# Altium footprint library GRM155Z71A225KE01D.PcbLib: 3 footprints
Each footprint in its own frame and in the unit in brackets; x right, y up, seen from the top. Pads: shape width x height; smd on the part's side, far side on the other; paste and mask are expansions set on the pad; w line width, h text height; cw(c..) or ccw(c..) is an arc to the next point about the centre after c.
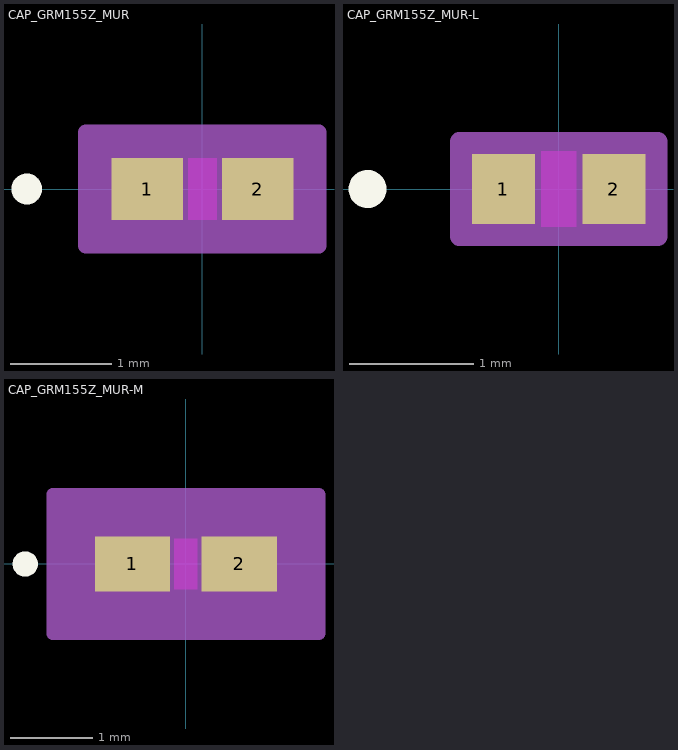
[diagram p0: the footprints below, top view; thin cyan lines are the x and y axes]

## CAP_GRM155Z_MUR [mil]
pads (2):
  rect 27.78x24 smd paste+0 mask+0: 1(-21.39,0) 2(21.39,0)
Top Layer keep-out:
  region: -5.5,-10 -5.5,10 5.5,10 5.5,-10
Top Overlay:
  circle w6: c-68.28,0 r3
  text ".Designator" at -137.5,-25 h50
Keep-Out Layer:
  region: -5.5,-12 -5.5,12 5.5,12 5.5,-12
Mechanical 13:
  circle w1: c-16.39,0 r3
  lines w1: -21.5,-12 -21.5,12 ; -21.5,-12 -7.5,-12 -7.5,12 -21.5,12 ; -21.5,-12 21.5,-12 ; -21.5,-12 -21.5,12 ; -21.5,12 21.5,12 ; 21.5,-12 7.5,-12 7.5,12 21.5,12 ; 21.5,-12 21.5,12 ; 21.5,-12 21.5,12
  text ".Designator" at -137.5,-25 h50
Mechanical 15:
  region: 45.28,-22 -45.28,-22 -45.28,22 45.28,22
  lines w6: -45.28,-22 -45.28,22 45.28,22 45.28,-22 -45.28,-22
3D body "CAP_GRM155Z_MUR.step": height 24.02, standoff 0, extent -21.5,-12.01 21.5,12.01

## CAP_GRM155Z_MUR-L [mil]
pads (2):
  rect 19.91x22.03 smd paste+0 mask+0: 1(-17.45,0) 2(17.45,0)
Top Layer keep-out:
  region: -5.5,-10 -5.5,10 5.5,10 5.5,-10
Top Overlay:
  circle w6: c-60.41,0 r3
  text ".Designator" at -137.5,-25 h50
Keep-Out Layer:
  region: -5.5,-12 -5.5,12 5.5,12 5.5,-12
Mechanical 13:
  circle w1: c-12.45,0 r3
  lines w1: -21.5,-12 -21.5,12 ; -21.5,-12 -7.5,-12 -7.5,12 -21.5,12 ; -21.5,-12 21.5,-12 ; -21.5,-12 -21.5,12 ; -21.5,12 21.5,12 ; 21.5,-12 7.5,-12 7.5,12 21.5,12 ; 21.5,-12 21.5,12 ; 21.5,-12 21.5,12
  text ".Designator" at -137.5,-25 h50
Mechanical 15:
  region: 31.41,-15.02 -31.41,-15.02 -31.41,15.02 31.41,15.02
  lines w6: -31.41,-15.02 -31.41,15.02 31.41,15.02 31.41,-15.02 -31.41,-15.02
3D body "CAP_GRM155Z_MUR.step": height 24.02, standoff 0, extent -21.5,-12.01 21.5,12.01

## CAP_GRM155Z_MUR-M [mil]
pads (2):
  rect 35.65x25.97 smd paste+0 mask+0: 1(-25.33,0) 2(25.33,0)
Top Layer keep-out:
  region: -5.5,-10 -5.5,10 5.5,10 5.5,-10
Top Overlay:
  circle w6: c-76.15,0 r3
  text ".Designator" at -137.5,-25 h50
Keep-Out Layer:
  region: -5.5,-12 -5.5,12 5.5,12 5.5,-12
Mechanical 13:
  circle w1: c-20.33,0 r3
  lines w1: -21.5,-12 -21.5,12 ; -21.5,-12 -7.5,-12 -7.5,12 -21.5,12 ; -21.5,-12 21.5,-12 ; -21.5,-12 -21.5,12 ; -21.5,12 21.5,12 ; 21.5,-12 7.5,-12 7.5,12 21.5,12 ; 21.5,-12 21.5,12 ; 21.5,-12 21.5,12
  text ".Designator" at -137.5,-25 h50
Mechanical 15:
  region: 63.15,-32.98 -63.15,-32.98 -63.15,32.98 63.15,32.98
  lines w6: -63.15,-32.98 -63.15,32.98 63.15,32.98 63.15,-32.98 -63.15,-32.98
3D body "CAP_GRM155Z_MUR.step": height 24.02, standoff 0, extent -21.5,-12.01 21.5,12.01